# Altium footprint library PM.PcbLib: 38 footprints (part 3 of 3)
Each footprint in its own frame and in the unit in brackets; x right, y up, seen from the top. Pads: shape width x height; smd on the part's side, far side on the other; paste and mask are expansions set on the pad; w line width, h text height; cw(c..) or ccw(c..) is an arc to the next point about the centre after c.
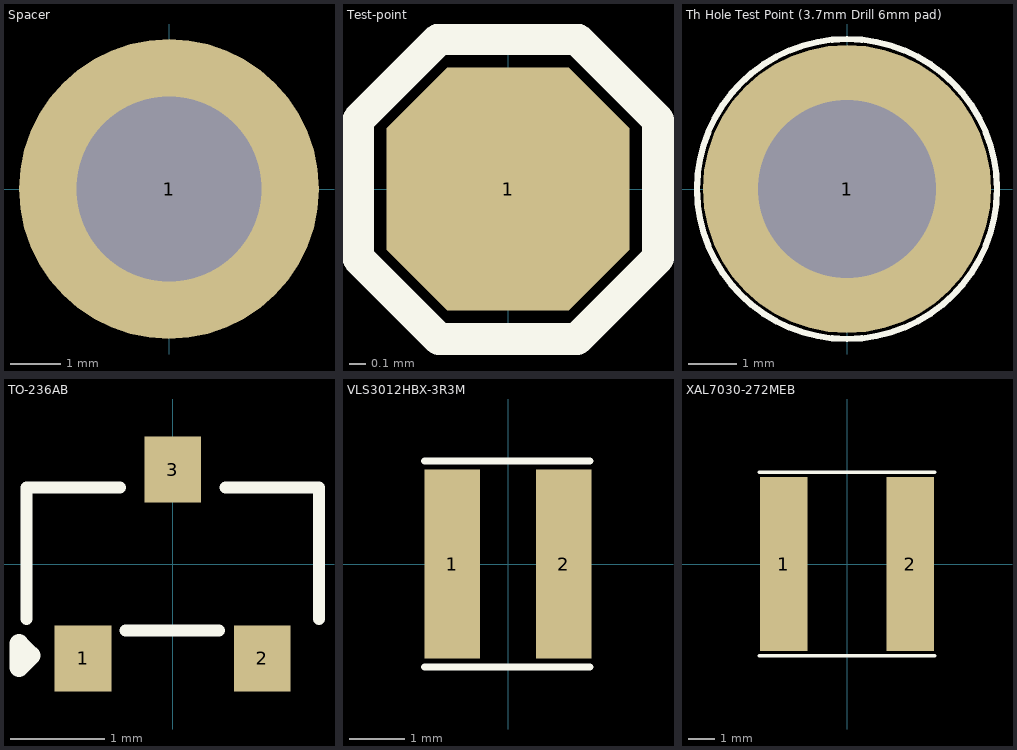
[diagram p2: the footprints below, top view; thin cyan lines are the x and y axes]

## Spacer [mm]
pads (1):
  round 6 hole 3.7: 1(0,0)
3D body "9774050151R.STEP": height 5.2, standoff -1.3, extent -2.55,-2.55 2.55,2.55

## Test-point [mil]
pads (1):
  oct 60x60 smd: 1(0,0)
Top Overlay:
  lines w7.87: -37,-17 -37,17 -17,37 17,37 37,17 37,-17 17,-37 -17,-37 -37,-17

## Th Hole Test Point (3.7mm Drill 6mm pad) [mm]
pads (1):
  round 6 hole 3.7: 1(0,0)
Top Overlay:
  circle w0.127: c0,0 r3.124

## TO-236AB [mm]
pads (3):
  rect 0.6x0.7 smd: 1(-0.95,-1) 2(0.95,-1) 3(0,1)
Top Overlay:
  lines w0.127: -1.549,-0.584 -1.549,0.813 -0.559,0.813 ; -0.498,-0.705 0.493,-0.705 ; 0.559,0.813 1.549,0.813 1.549,-0.584
  lines w0.2: -1.628,-1.097 -1.501,-0.97 -1.628,-0.843 -1.628,-1.097
3D body "User Library-SOT95P240X110-3M[SOT23-3_TO-236AB].step": height 1.09, standoff 0, extent -1.5,-1.25 1.5,1.25

## VLS3012HBX-3R3M [mm]
pads (2):
  rect 1x3.4 smd: 1(-1,0) 2(1,0)
Top Overlay:
  lines w0.127: -1.499,-1.854 1.473,-1.854 ; -1.499,1.854 1.473,1.854
3D body "VLS3012HBX-3R3M.STEP": height 1.32, standoff 0.1, extent -1.51,-1.51 1.51,1.51

## XAL7030-272MEB [mm]
pads (2):
  rect 1.78x6.5 smd: 1(-2.36,0) 2(2.36,0)
Top Overlay:
  lines w0.127: -3.277,-3.429 3.277,-3.429 ; -3.277,3.429 3.277,3.429
3D body "XAL7030-272MEB.stp": height 3.1, standoff 0, extent -3.277,-3.378 3.277,3.378